# Altium footprint library 28Pins_Project.PcbLib: 10 footprints
Each footprint in its own frame and in the unit in brackets; x right, y up, seen from the top. Pads: shape width x height; smd on the part's side, far side on the other; paste and mask are expansions set on the pad; w line width, h text height; cw(c..) or ccw(c..) is an arc to the next point about the centre after c.
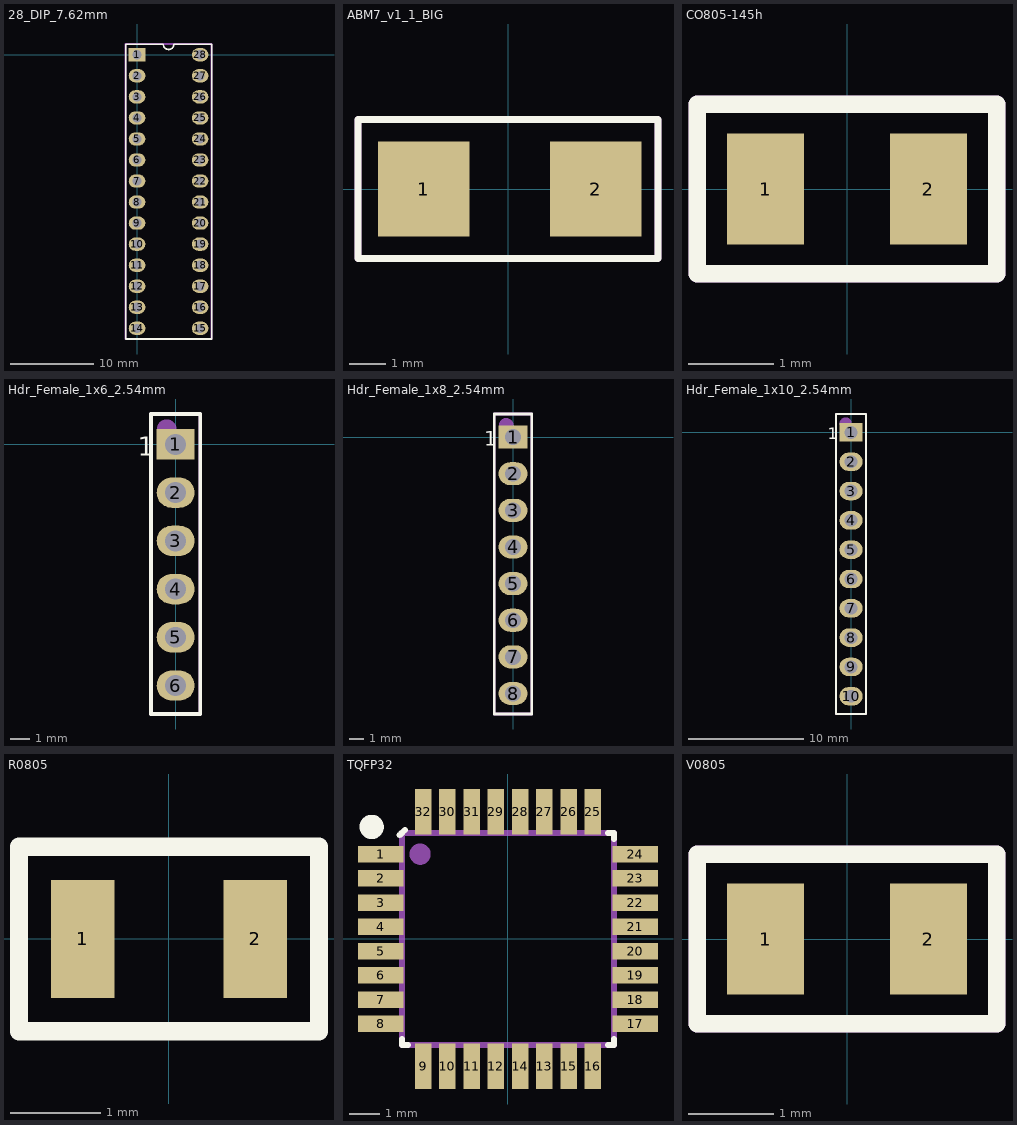
[diagram p0: the footprints below, top view; thin cyan lines are the x and y axes]

## 28_DIP_7.62mm [mm]
pads (28):
  rect 2x1.6 hole 1.1: 1(0,0)
  oval 2x1.6 hole 1.1: 2(0,-2.54) 3(0,-5.08) 4(0,-7.62) 5(0,-10.16) 6(0,-12.7) 7(0,-15.24) 8(0,-17.78) 9(0,-20.32) 10(0,-22.86) 11(0,-25.4) 12(0,-27.94) 13(0,-30.48) 14(0,-33.02) 15(7.62,-33.02) 16(7.62,-30.48) 17(7.62,-27.94) 18(7.62,-25.4) 19(7.62,-22.86) 20(7.62,-20.32) 21(7.62,-17.78) 22(7.62,-15.24) 23(7.62,-12.7) 24(7.62,-10.16) 25(7.62,-7.62) 26(7.62,-5.08) 27(7.62,-2.54) 28(7.62,0)
Top Overlay:
  lines w0.2: -1.365,-34.31 9.01,-34.31 9.01,1.27 4.445,1.27 cw(c3.81,1.27) 3.175,1.27 -1.365,1.27 -1.365,-7.72 -1.365,-25.6 -1.365,-34.31
Mechanical 29:
  circle w0.5: c0.01,-0.01 r0.25
  lines w0: 8.81,-34.31 9.11,-34.31
  lines w0.254: -1.39,-34.31 8.81,-34.31 9.01,-34.31 9.01,1.29 -1.39,1.29 -1.39,-34.31
  text ".Designator" at 4.548,-22.856 h1.52
3D body "User Library-DIP28.STEP": height 4.57, standoff -3.81, extent -0.01,-34.035 7.81,1.015

## ABM7_v1_1_BIG [mm]
pads (2):
  rect 2.5x2.6 smd: 1(-2.3,0) 2(2.4,0)
Top Overlay:
  lines w0.2: -4.1,-1.9 -4.1,1.9 4.1,1.9 4.1,-1.9 -4.1,-1.9
Mechanical 29:
  lines w0.2: -4.1,-1.9 -4.1,1.9 4.1,1.9 4.1,-1.9 -4.1,-1.9
  text ".Designator" at -3.146,-0.638 h1.52
3D body "User Library-ABM7-1.STEP": height 1.36, standoff -0.04, extent -3.112,-1.9 3.1,1.9

## CO805-145h [mm]
pads (2):
  rect 0.9x1.3 smd: 1(-0.95,0) 2(0.95,0)
Top Overlay:
  lines w0.2: -1.75,-0.991 -1.75,0 -1.75,0.991 1.75,0.991 1.75,-0.991 -1.75,-0.991
Mechanical 29:
  lines w0.2: -1.753,-0.991 1.753,-0.991 1.753,0.991 -1.753,0.991 -1.753,-0.991
  text ".Designator" at -1.043,-0.31 h0.6
3D body "User Library-CAPC2012X___.STEP": height 1.47, standoff 0, extent -1,-0.635 1,0.635

## Hdr_Female_1x6_2.54mm [mm]
pads (6):
  rect 2x1.6 hole 1.1: 1(0,0)
  oval 2x1.6 hole 1.1: 2(0,-2.54) 3(0,-5.08) 4(0,-7.62) 5(0,-10.16) 6(0,-12.7)
Top Overlay:
  lines w0.2: 1.275,-14.2 0.35,-14.2 -0.4,-14.2 -1.3,-14.2 -1.3,1.6 1.3,1.6 1.3,-14.2
  text "1" at -2,-0.6 h1
Mechanical 1:
  circle w0.762: c-0.468,0.8 r0.132
  lines w0.2: -1.3,-14.2 1.3,-14.2 1.3,1.6 -1.3,1.6 -1.3,-14.2
  text ".Designator" at 0.638,-8.246 h1.52
3D body "1613515.stp": height 8.31, standoff -3.19, extent -1.25,-14.04 1.25,1.6

## Hdr_Female_1x8_2.54mm [mm]
pads (8):
  rect 2x1.6 hole 1.1: 1(0,0)
  oval 2x1.6 hole 1.1: 2(0,-2.54) 3(0,-5.08) 4(0,-7.62) 5(0,-10.16) 6(0,-12.7) 7(0,-15.24) 8(0,-17.78)
Top Overlay:
  lines w0.2: -1.3,-19.2 -1.3,1.6 1.3,1.6 1.3,-19.2 ; -1.275,-19.2 -0.4,-19.2 0.35,-19.2 1.275,-19.2
  text "1" at -2,-0.6 h1
Mechanical 1:
  circle w0.762: c-0.468,0.8 r0.132
  lines w0.2: -1.3,-19.2 -1.3,1.6 1.3,1.6 1.3,-19.2 -1.3,-19.2
  text ".Designator" at 0.538,-15.546 h1.52
3D body "m20-7820842.stp": height 8.31, standoff -3.19, extent -1.2,-19.12 1.3,1.6

## Hdr_Female_1x10_2.54mm [mm]
pads (10):
  rect 2x1.6 hole 1.1: 1(0,0)
  oval 2x1.6 hole 1.1: 2(0,-2.54) 3(0,-5.08) 4(0,-7.62) 5(0,-10.16) 6(0,-12.7) 7(0,-15.24) 8(0,-17.78) 9(0,-20.32) 10(0,-22.86)
Top Overlay:
  lines w0.2: -1.3,-24.4 -0.325,-24.4 0.425,-24.4 1.3,-24.4 1.3,1.6 -1.3,1.6 -1.3,-24.4
  text "1" at -2,-0.6 h1
Mechanical 1:
  circle w0.762: c-0.468,0.8 r0.132
  lines w0.2: -1.3,-24.4 -1.3,1.6 1.3,1.6 1.3,-24.4 -1.3,-24.4
  text ".Designator" at 0.538,-15.546 h1.52
3D body "m20-7821046_asm.stp": height 8.31, standoff -3.19, extent -1.3,-24.3 1.2,1.5

## PCBComponent_1 [mm]

## R0805 [mm]
pads (2):
  rect 0.7x1.3 smd: 1(-0.95,0) 2(0.95,0)
Top Overlay:
  lines w0.2: -1.651,-1.016 1.651,-1.016 1.651,1.016 -1.651,1.016 -1.651,0.127 -1.651,-1.016
3D body "User Library-Chip Resistor2.step": height 0.71, standoff 0.01, extent -1,-0.6 1,0.6

## TQFP32 [mm]
pads (32):
  rect 1.5x0.55 smd mask+0.06: 1(-4.2,2.8) 2(-4.2,2) 3(-4.2,1.2) 4(-4.2,0.4) 5(-4.2,-0.4) 6(-4.2,-1.2) 7(-4.2,-2) 8(-4.2,-2.8) 17(4.2,-2.8) 18(4.2,-2) 19(4.2,-1.2) 20(4.2,-0.4) 21(4.2,0.4) 22(4.2,1.2) 23(4.2,2) 24(4.2,2.8)
  rect 0.55x1.5 smd mask+0.06: 9(-2.8,-4.2) 10(-2,-4.2) 11(-1.2,-4.2) 12(-0.4,-4.2) 13(1.2,-4.2) 14(0.4,-4.2) 15(2,-4.2) 16(2.8,-4.2) 25(2.8,4.2) 26(2,4.2) 27(1.2,4.2) 28(0.4,4.2) 29(-0.4,4.2) 30(-2,4.2) 31(-1.2,4.2) 32(-2.8,4.2)
Top Overlay:
  circle w0.6: c-4.5,3.7 r0.1
  lines w0.2: -3.5,-3.3 -3.5,-3.5 -3.3,-3.5 ; -3.5,3.5 -3.575,3.425 -3.525,3.475 -3.4,3.6 ; 3.3,-3.5 3.5,-3.5 3.5,-3.3 ; 3.3,3.5 3.5,3.5 3.5,3.3
Mechanical 29:
  circle w0.5: c-2.9,2.8 r0.1
  lines w0.2: -3.5,-3.5 -3.5,3.5 3.5,3.5 3.5,-3.5 -3.5,-3.5
  text ". Designator" at -2.1,0.1 h1.5
3D body "User Library-tqfp32.STEP": height 1.2, standoff 0, extent -4.599,-4.6 4.599,4.599

## V0805 [mm]
pads (2):
  rect 0.9x1.3 smd: 1(-0.95,0) 2(0.95,0)
Top Overlay:
  lines w0.2: -1.75,-0.991 1.75,-0.991 1.75,0.991 -1.75,0.991 -1.75,0 -1.75,-0.991
Mechanical 29:
  lines w0.2: -1.753,-0.991 -1.753,0.991 1.753,0.991 1.753,-0.991 -1.753,-0.991
  text ".Designator" at -1.043,-0.31 h0.6
3D body "User Library-CAPC2012X125N.STEP": height 1.26, standoff 0.01, extent -0.984,-0.625 1.016,0.625